# Altium schematic symbol library Components.SchLib: 76 symbols
Pins are listed as number, name and electrical type; pins without a type are passive.

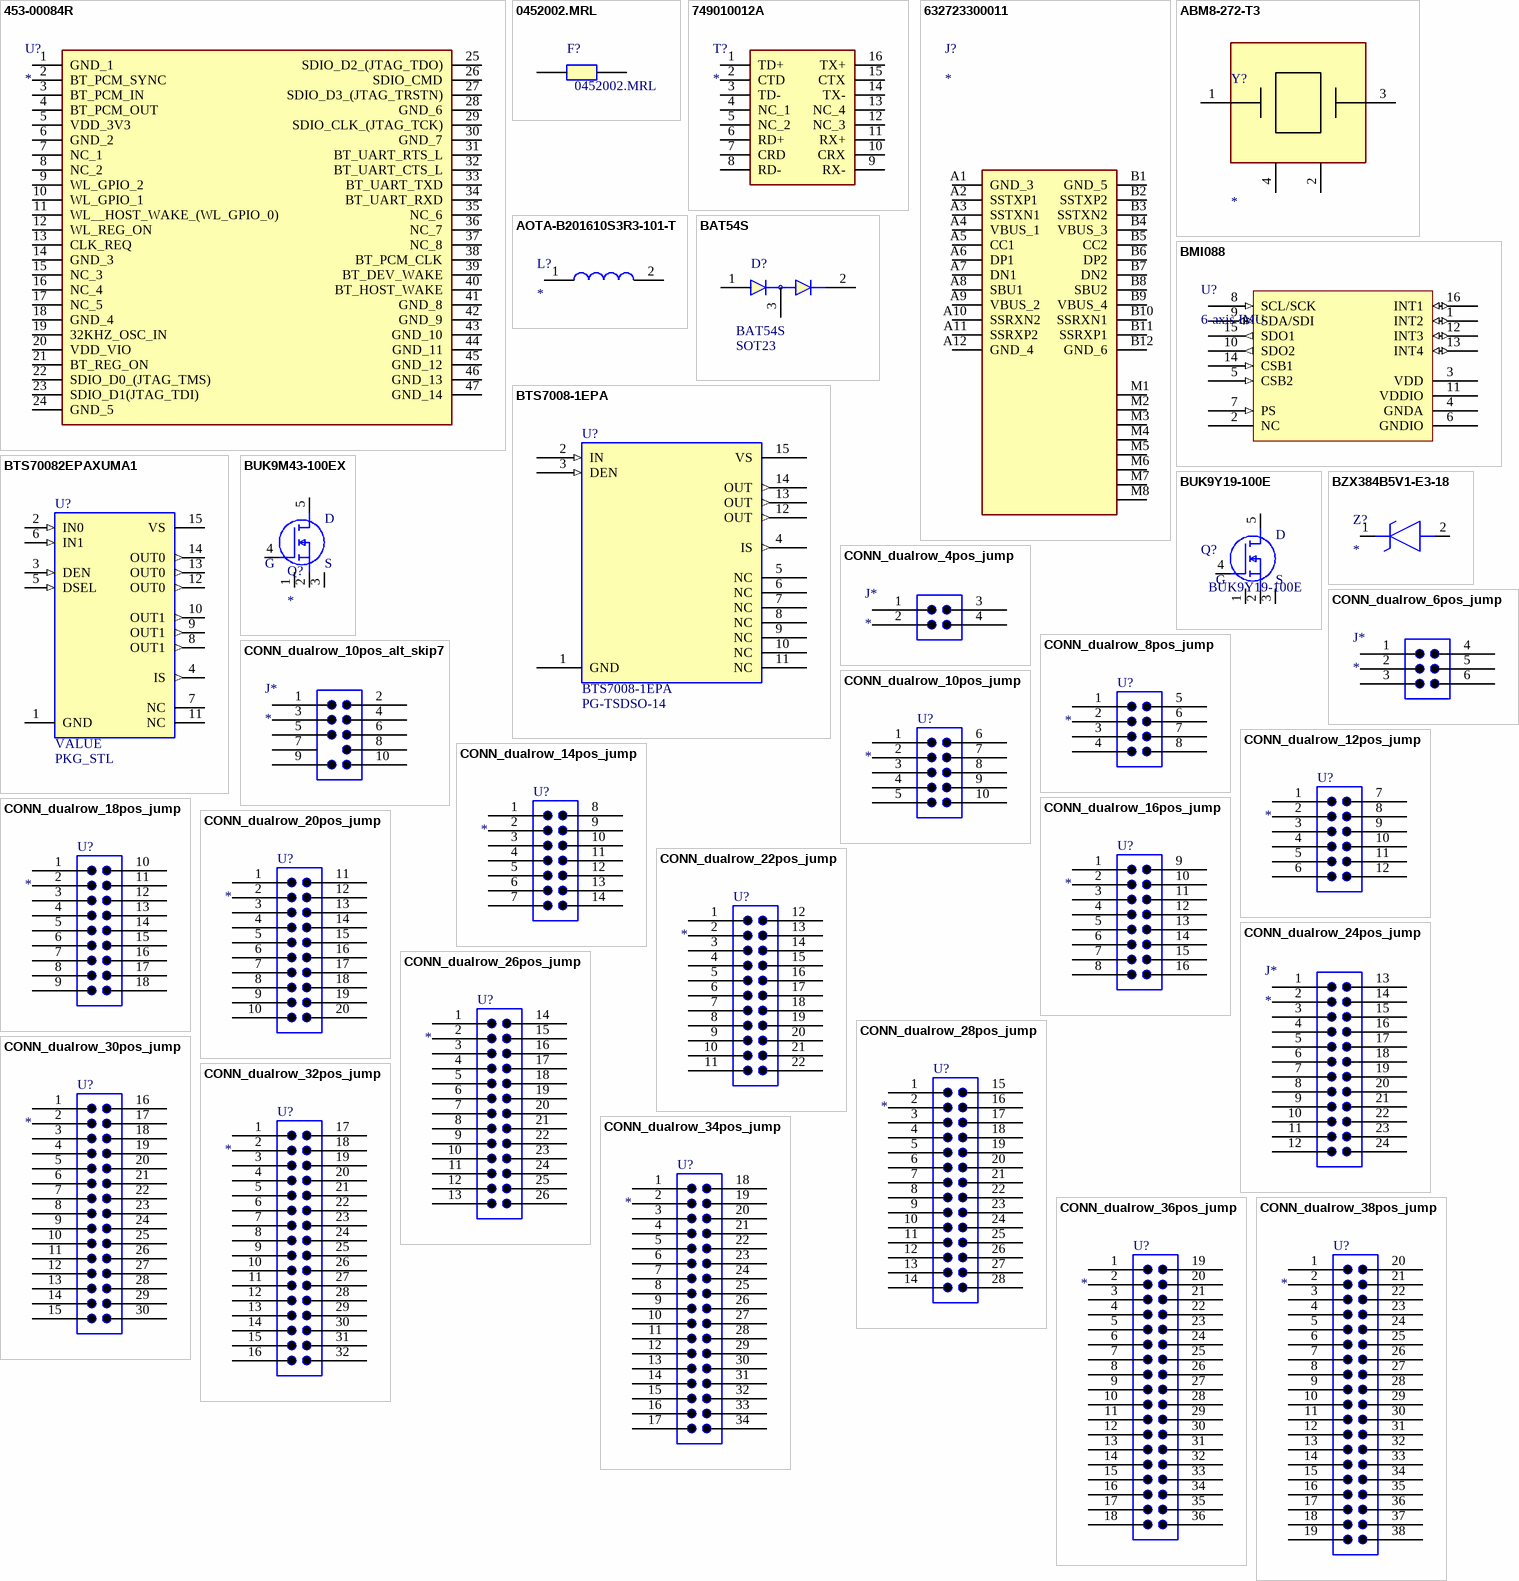
[diagram p0: symbols 453-00084R to CONN_dualrow_38pos_jump]

## 453-00084R
designator U?
Integrated Circuit; Manufacturer_Name: EZURIO; Manufacturer_Part_Number: 453-00084R; Datasheet Link: https://www.ezurio.com/documentation/datasheet-sterling-lwb-0; Height: 2.45mm; Category: Modules
footprint 45300084R
pins: 1 GND_1, 2 BT_PCM_SYNC, 3 BT_PCM_IN, 4 BT_PCM_OUT, 5 VDD_3V3, 6 GND_2, 7 NC_1, 8 NC_2, 9 WL_GPIO_2, 10 WL_GPIO_1, 11 WL__HOST_WAKE_(WL_GPIO_0), 12 WL_REG_ON, 13 CLK_REQ, 14 GND_3, 15 NC_3, 16 NC_4, 17 NC_5, 18 GND_4, 19 32KHZ_OSC_IN, 20 VDD_VIO, 21 BT_REG_ON, 22 SDIO_D0_(JTAG_TMS), 23 SDIO_D1(JTAG_TDI), 24 GND_5, 25 SDIO_D2_(JTAG_TDO), 26 SDIO_CMD, 27 SDIO_D3_(JTAG_TRSTN), 28 GND_6, 29 SDIO_CLK_(JTAG_TCK), 30 GND_7, 31 BT_UART_RTS_L, 32 BT_UART_CTS_L, 33 BT_UART_TXD, 34 BT_UART_RXD, 35 NC_6, 36 NC_7, 37 NC_8, 38 BT_PCM_CLK, 39 BT_DEV_WAKE, 40 BT_HOST_WAKE, 41 GND_8, 42 GND_9, 43 GND_10, 44 GND_11, 45 GND_12, 46 GND_13, 47 GND_14

## 0452002.MRL
designator F?
Littelfuse NANO2 452 fuse 2 A slow-blow 125 V 2410; Manufacturer: Littelfuse; Manufacturer Part Number: 0452002.MRL; Category: Passives
footprint LF_NANO2_2410
pins: 1, 2

## 749010012A
designator T?
Transformer; Manufacturer_Name: Wurth Elektronik; Manufacturer_Part_Number: 749010012A; Datasheet Link: https://www.we-online.com/catalog/datasheet/749010012A.pdf; Height: 5.4mm; Mouser Part Number: 710-749010012A; Mouser Price/Stock: https://www.mouser.co.uk/ProductDetail/Wurth-Elektronik/749010012A?qs=2sV1BwmkawS67xGrCyXf%2Fw%3D%3D; Category: Passives
footprint 749010012A
pins: 1 TD+, 2 CTD, 3 TD-, 4 NC_1, 5 NC_2, 6 RD+, 7 CRD, 8 RD-, 9 RX-, 10 CRX, 11 RX+, 12 NC_3, 13 NC_4, 14 TX-, 15 CTX, 16 TX+

## 632723300011
designator J?
Connector; Manufacturer_Name: Wurth Elektronik; Manufacturer_Part_Number: 632723300011; Datasheet Link: https://www.we-online.com/catalog/datasheet/632723300011.pdf; Height: 2mm; Mouser Part Number: 710-632723300011; Mouser Price/Stock: https://www.mouser.co.uk/ProductDetail/Wurth-Elektronik/632723300011?qs=NK6InXoXhq4%252B5eM1PePLPg%3D%3D; Category: Connectors
footprint 632723300011
pins: A1 GND_3, A2 SSTXP1, A3 SSTXN1, A4 VBUS_1, A5 CC1, A6 DP1, A7 DN1, A8 SBU1, A9 VBUS_2, A10 SSRXN2, A11 SSRXP2, A12 GND_4, B1 GND_5, B2 SSTXP2, B3 SSTXN2, B4 VBUS_3, B5 CC2, B6 DP2, B7 DN2, B8 SBU2, B9 VBUS_4, B10 SSRXN1, B11 SSRXP1, B12 GND_6, M1, M2, M3, M4, M5, M6, M7, M8

## ABM8-272-T3
designator Y?
Crystal; Manufacturer_Name: ABRACON; Manufacturer_Part_Number: ABM8-272-T3; Datasheet Link: https://abracon.com/datasheets/ABM8-272-T3.pdf; Height: 0.8mm; Mouser Part Number: 815-ABM8-272-T3; Mouser Price/Stock: https://www.mouser.co.uk/ProductDetail/ABRACON/ABM8-272-T3?qs=QpmGXVUTftEj6miOiJBMxQ%3D%3D; Category: Passives
footprint ABM8272T3
pins: 1, 2, 3, 4

## AOTA-B201610S3R3-101-T
designator L?
Inductor; Manufacturer_Name: ABRACON; Manufacturer_Part_Number: AOTA-B201610S3R3-101-T; Datasheet Link: https://abracon.com/datasheets/AOTA-B201610S3R3-101-T.pdf; Height: 1mm; Mouser Part Number: 815-AB201610S3R3101T; Mouser Price/Stock: https://www.mouser.co.uk/ProductDetail/ABRACON/AOTA-B201610S3R3-101-T?qs=%252BXxaIXUDbq0IZvJW%2F2mv4w%3D%3D; Arrow Part Number: AOTA-B201610S3R3-101-T; Arrow Price/Stock: https://www.arrow.com/en/products/aota-b201610s3r3-101-t/abracon?utm_currency=USD&region=nac; Category: Passives
footprint AOTAB201610S3R3101T
pins: 1, 2

## BAT54S
designator D?  PKG_STYLE: SOT23  (hidden comment: BAT54S)
Dual Schottky barrier diode series 30 V 200 mA SOT23 (1 = A1 2 = K2 3 = K1/A2); PLACE: YES; VALUE: BAT54S; Category: Discretes
footprint SOT23_BAT54S
pins: 1 A1, 2 K2, 3 K1A2

## BMI088
designator U?, comment 6-axis IMU
6-axis motion tracking, high-performance; Category: Sensors
footprint BMI088
pins: 1 INT2 (io), 2 NC, 3 VDD (power), 4 GNDA (power), 5 CSB2 (in), 6 GNDIO (power), 7 PS (in), 8 SCL/SCK (in), 9 SDA/SDI (io), 10 SDO2 (out), 11 VDDIO (power), 12 INT3 (io), 13 INT4 (io), 14 CSB1 (in), 15 SDO1 (out), 16 INT1 (io)

## BTS7008-1EPA
designator U?  PKG_STYLE: PG-TSDSO-14  (hidden comment: BTS7008-1EPA)
Infineon PROFET+2 12V smart high-side switch 1 ch 8 mOhm PG-TSDSO-14 with exposed pad (EP = VS); PLACE: YES; VALUE: BTS7008-1EPA; Category: Power
footprint PG-TSDSO-14_BTS7008
pins: 1 GND (power), 2 IN (in), 3 DEN (in), 4 IS (out), 5 NC, 6 NC, 7 NC, 8 NC, 9 NC, 10 NC, 11 NC, 12 OUT (out), 13 OUT (out), 14 OUT (out), 15 VS (power)

## BTS70082EPAXUMA1
designator U?  PKG_STYLE: PKG_STL  (hidden comment: BTS70082EPAXUMA1)
Infineon BTS7008-2EPA PROFET+2 12V dual 8 mohm smart high-side switch, PG-TSDSO-14, EP = 15 (VS); PLACE: YES; Manufacturer: Infineon; Manufacturer Part Number: BTS70082EPAXUMA1; VALUE: VALUE; Category: Power
footprint IFX_PG-TSDSO-14
pins: 1 GND (power), 2 IN0 (in), 3 DEN (in), 4 IS (out), 5 DSEL (in), 6 IN1 (in), 7 NC, 8 OUT1 (out), 9 OUT1 (out), 10 OUT1 (out), 11 NC, 12 OUT0 (out), 13 OUT0 (out), 14 OUT0 (out), 15 VS (power)

## BUK9M43-100EX
designator Q?
MOSFET (N-Channel); Manufacturer_Name: Nexperia; Manufacturer_Part_Number: BUK9M43-100EX; Datasheet Link: https://assets.nexperia.com/documents/data-sheet/BUK9M43-100E.pdf; Height: 1mm; Mouser Part Number: 771-BUK9M43-100EX; Mouser Price/Stock: https://www.mouser.co.uk/ProductDetail/Nexperia/BUK9M43-100EX?qs=VNgDqqxT8YV9a5FWS9qs3Q%3D%3D; Arrow Part Number: BUK9M43-100EX; Arrow Price/Stock: https://www.arrow.com/en/products/buk9m43-100ex/nexperia; Category: Discretes
footprint BUK9M156100EX
pins: 1 S, 2 S, 3 S, 4 G, 5 D

## BUK9Y19-100E
designator Q?
Nexperia BUK9Y19-100E N-ch 100 V 19 mohm LFPAK56 (AEC-Q101); Manufacturer: Nexperia; Manufacturer Part Number: BUK9Y19-100E; Category: Discretes
footprint LFPAK56_SOT669
pins: 1 S, 2 S, 3 S, 4 G, 5 D

## BZX384B5V1-E3-18
designator Z?
Zener Diode; Manufacturer_Name: Vishay; Manufacturer_Part_Number: BZX384B5V1-E3-18; Datasheet Link: https://www.vishay.com/docs/85764/bzx384.pdf; Height: 1.15mm; Mouser Part Number: 78-BZX384B5V1-E3-18; Mouser Price/Stock: https://www.mouser.co.uk/ProductDetail/Vishay-Semiconductors/BZX384B5V1-E3-18?qs=KP8Io%2FXyE5RB469oWB6DPA%3D%3D; Arrow Part Number: BZX384B5V1-E3-18; Arrow Price/Stock: https://www.arrow.com/en/products/bzx384b5v1-e3-18/vishay?region=nac; Category: Discretes
footprint SOD2713X115N
pins: 1 K, 2 A

## CONN_dualrow_4pos_jump
designator J*
Category: Connectors
footprint SAMTEC_IPL1-102-01-X-D-K
pins: 1, 2, 3, 4

## CONN_dualrow_6pos_jump
designator J*
Category: Connectors
footprint SAMTEC_IPL1-103-01-X-D-K
pins: 1, 2, 3, 4, 5, 6

## CONN_dualrow_8pos_jump
designator U?
Dual row connector, 8 pins (4 per row), row-sequential numbering; Category: Connectors
footprint SAMTEC_IPL1-104-01-X-D-K
pins: 1, 2, 3, 4, 5, 6, 7, 8

## CONN_dualrow_10pos_alt_skip7
designator J*
Category: Connectors
footprint SAMTEC_FTSH-105-01-X-DV-P-K-X
pins: 1, 2, 3, 4, 5, 6, 7, 8, 9, 10

## CONN_dualrow_10pos_jump
designator U?
Dual row connector, 10 pins (5 per row), row-sequential numbering; Category: Connectors
footprint SAMTEC_IPL1-105-01-X-D-K
pins: 1, 2, 3, 4, 5, 6, 7, 8, 9, 10

## CONN_dualrow_12pos_jump
designator U?
Dual row connector, 12 pins (6 per row), row-sequential numbering; Category: Connectors
footprint SAMTEC_IPL1-106-01-X-D-K
pins: 1, 2, 3, 4, 5, 6, 7, 8, 9, 10, 11, 12

## CONN_dualrow_14pos_jump
designator U?
Dual row connector, 14 pins (7 per row), row-sequential numbering; Category: Connectors
footprint SAMTEC_IPL1-107-01-X-D-K
pins: 1, 2, 3, 4, 5, 6, 7, 8, 9, 10, 11, 12, 13, 14

## CONN_dualrow_16pos_jump
designator U?
Dual row connector, 16 pins (8 per row), row-sequential numbering; Category: Connectors
footprint SAMTEC_IPL1-108-01-X-D-K
pins: 1, 2, 3, 4, 5, 6, 7, 8, 9, 10, 11, 12, 13, 14, 15, 16

## CONN_dualrow_18pos_jump
designator U?
Dual row connector, 18 pins (9 per row), row-sequential numbering; Category: Connectors
footprint SAMTEC_IPL1-109-01-X-D-K
pins: 1, 2, 3, 4, 5, 6, 7, 8, 9, 10, 11, 12, 13, 14, 15, 16, 17, 18

## CONN_dualrow_20pos_jump
designator U?
Dual row connector, 20 pins (10 per row), row-sequential numbering; Category: Connectors
footprint SAMTEC_IPL1-110-01-X-D-K
pins: 1, 2, 3, 4, 5, 6, 7, 8, 9, 10, 11, 12, 13, 14, 15, 16, 17, 18, 19, 20

## CONN_dualrow_22pos_jump
designator U?
Dual row connector, 22 pins (11 per row), row-sequential numbering; Category: Connectors
footprint SAMTEC_IPL1-111-01-X-D-K
pins: 1, 2, 3, 4, 5, 6, 7, 8, 9, 10, 11, 12, 13, 14, 15, 16, 17, 18, 19, 20, 21, 22

## CONN_dualrow_24pos_jump
designator J*
Category: Connectors
footprint SAMTEC_IPL1-112-01-X-D-K
pins: 1, 2, 3, 4, 5, 6, 7, 8, 9, 10, 11, 12, 13, 14, 15, 16, 17, 18, 19, 20, 21, 22, 23, 24

## CONN_dualrow_26pos_jump
designator U?
Dual row connector, 26 pins (13 per row), row-sequential numbering; Category: Connectors
footprint SAMTEC_IPL1-113-01-X-D-K
pins: 1, 2, 3, 4, 5, 6, 7, 8, 9, 10, 11, 12, 13, 14, 15, 16, 17, 18, 19, 20, 21, 22, 23, 24, 25, 26

## CONN_dualrow_28pos_jump
designator U?
Dual row connector, 28 pins (14 per row), row-sequential numbering; Category: Connectors
footprint SAMTEC_IPL1-114-01-X-D-K
pins: 1, 2, 3, 4, 5, 6, 7, 8, 9, 10, 11, 12, 13, 14, 15, 16, 17, 18, 19, 20, 21, 22, 23, 24, 25, 26, 27, 28

## CONN_dualrow_30pos_jump
designator U?
Dual row connector, 30 pins (15 per row), row-sequential numbering; Category: Connectors
footprint SAMTEC_IPL1-115-01-X-D-K
pins: 1, 2, 3, 4, 5, 6, 7, 8, 9, 10, 11, 12, 13, 14, 15, 16, 17, 18, 19, 20, 21, 22, 23, 24, 25, 26, 27, 28, 29, 30

## CONN_dualrow_32pos_jump
designator U?
Dual row connector, 32 pins (16 per row), row-sequential numbering; Category: Connectors
footprint SAMTEC_IPL1-116-01-X-D-K
pins: 1, 2, 3, 4, 5, 6, 7, 8, 9, 10, 11, 12, 13, 14, 15, 16, 17, 18, 19, 20, 21, 22, 23, 24, 25, 26, 27, 28, 29, 30, 31, 32

## CONN_dualrow_34pos_jump
designator U?
Dual row connector, 34 pins (17 per row), row-sequential numbering; Category: Connectors
footprint SAMTEC_IPL1-117-01-X-D-K
pins: 1, 2, 3, 4, 5, 6, 7, 8, 9, 10, 11, 12, 13, 14, 15, 16, 17, 18, 19, 20, 21, 22, 23, 24, 25, 26, 27, 28, 29, 30, 31, 32, 33, 34

## CONN_dualrow_36pos_jump
designator U?
Dual row connector, 36 pins (18 per row), row-sequential numbering; Category: Connectors
footprint SAMTEC_IPL1-118-01-X-D-K
pins: 1, 2, 3, 4, 5, 6, 7, 8, 9, 10, 11, 12, 13, 14, 15, 16, 17, 18, 19, 20, 21, 22, 23, 24, 25, 26, 27, 28, 29, 30, 31, 32, 33, 34, 35, 36

## CONN_dualrow_38pos_jump
designator U?
Dual row connector, 38 pins (19 per row), row-sequential numbering; Category: Connectors
footprint SAMTEC_IPL1-119-01-X-D-K
pins: 1, 2, 3, 4, 5, 6, 7, 8, 9, 10, 11, 12, 13, 14, 15, 16, 17, 18, 19, 20, 21, 22, 23, 24, 25, 26, 27, 28, 29, 30, 31, 32, 33, 34, 35, 36, 37, 38

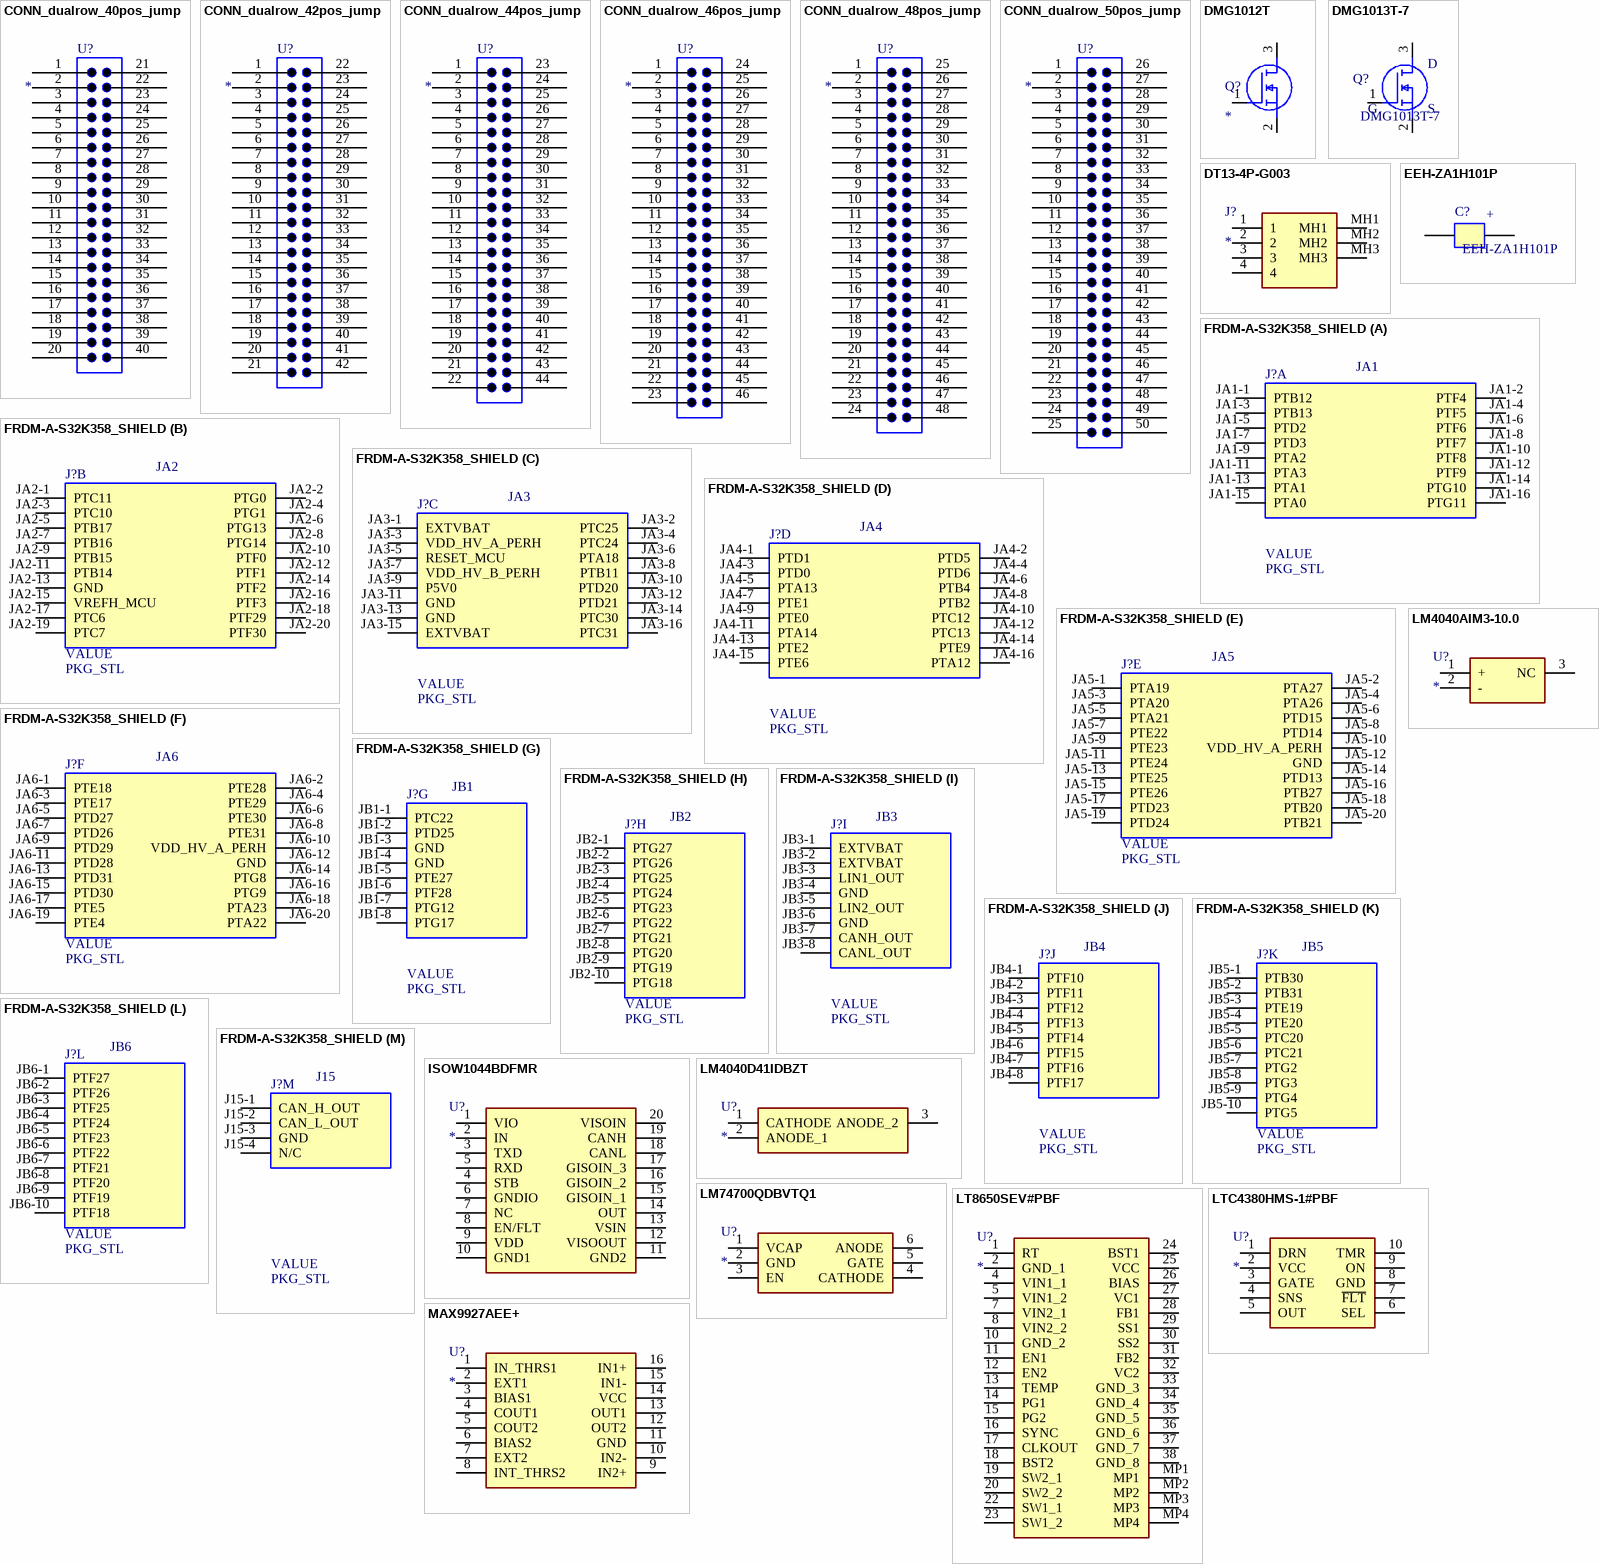
[diagram p1: symbols CONN_dualrow_40pos_jump to MAX9927AEE+]

## CONN_dualrow_40pos_jump
designator U?
Dual row connector, 40 pins (20 per row), row-sequential numbering; Category: Connectors
footprint SAMTEC_IPL1-120-01-X-D-K
pins: 1, 2, 3, 4, 5, 6, 7, 8, 9, 10, 11, 12, 13, 14, 15, 16, 17, 18, 19, 20, 21, 22, 23, 24, 25, 26, 27, 28, 29, 30, 31, 32, 33, 34, 35, 36, 37, 38, 39, 40

## CONN_dualrow_42pos_jump
designator U?
Dual row connector, 42 pins (21 per row), row-sequential numbering; Category: Connectors
footprint SAMTEC_IPL1-121-01-X-D-K
pins: 1, 2, 3, 4, 5, 6, 7, 8, 9, 10, 11, 12, 13, 14, 15, 16, 17, 18, 19, 20, 21, 22, 23, 24, 25, 26, 27, 28, 29, 30, 31, 32, 33, 34, 35, 36, 37, 38, 39, 40, 41, 42

## CONN_dualrow_44pos_jump
designator U?
Dual row connector, 44 pins (22 per row), row-sequential numbering; Category: Connectors
footprint SAMTEC_IPL1-122-01-X-D-K
pins: 1, 2, 3, 4, 5, 6, 7, 8, 9, 10, 11, 12, 13, 14, 15, 16, 17, 18, 19, 20, 21, 22, 23, 24, 25, 26, 27, 28, 29, 30, 31, 32, 33, 34, 35, 36, 37, 38, 39, 40, 41, 42, 43, 44

## CONN_dualrow_46pos_jump
designator U?
Dual row connector, 46 pins (23 per row), row-sequential numbering; Category: Connectors
footprint SAMTEC_IPL1-123-01-X-D-K
pins: 1, 2, 3, 4, 5, 6, 7, 8, 9, 10, 11, 12, 13, 14, 15, 16, 17, 18, 19, 20, 21, 22, 23, 24, 25, 26, 27, 28, 29, 30, 31, 32, 33, 34, 35, 36, 37, 38, 39, 40, 41, 42, 43, 44, 45, 46

## CONN_dualrow_48pos_jump
designator U?
Dual row connector, 48 pins (24 per row), row-sequential numbering; Category: Connectors
footprint SAMTEC_IPL1-124-01-X-D-K
pins: 1, 2, 3, 4, 5, 6, 7, 8, 9, 10, 11, 12, 13, 14, 15, 16, 17, 18, 19, 20, 21, 22, 23, 24, 25, 26, 27, 28, 29, 30, 31, 32, 33, 34, 35, 36, 37, 38, 39, 40, 41, 42, 43, 44, 45, 46, 47, 48

## CONN_dualrow_50pos_jump
designator U?
Dual row connector, 50 pins (25 per row), row-sequential numbering; Category: Connectors
footprint SAMTEC_IPL1-125-01-X-D-K
pins: 1, 2, 3, 4, 5, 6, 7, 8, 9, 10, 11, 12, 13, 14, 15, 16, 17, 18, 19, 20, 21, 22, 23, 24, 25, 26, 27, 28, 29, 30, 31, 32, 33, 34, 35, 36, 37, 38, 39, 40, 41, 42, 43, 44, 45, 46, 47, 48, 49, 50

## DMG1012T
designator Q?
MOSFET (N-Channel); Manufacturer_Name: Diodes Incorporated; Manufacturer_Part_Number: DMG1012T; Datasheet Link: https://www.diodes.com/datasheet/download/DMG1012T.pdf; Height: 0.9mm; Mouser Part Number: N/A; Mouser Price/Stock: https://www.mouser.co.uk/ProductDetail/Diodes-Incorporated/DMG1012T?qs=Wj%2FVkw3K%252BMD5naxckZUW%2FA%3D%3D; Category: Discretes
footprint SOT50P160X90-3N
pins: 1 G, 2 S, 3 D

## DMG1013T-7
designator Q?
Diodes DMG1013T P-ch 20 V SOT-523; Manufacturer: Diodes Incorporated; Manufacturer Part Number: DMG1013T-7; Category: Discretes
footprint SOT523_DIODES
pins: 1 G, 2 S, 3 D

## DT13-4P-G003
designator J?
Connector; Manufacturer_Name: TE Connectivity; Manufacturer_Part_Number: DT13-4P-G003; Datasheet Link: https://www.te.com/en/product-DT13-4P-G003.html; Height: 35.89mm; Mouser Part Number: 571-DT13-4P-G003; Mouser Price/Stock: https://www.mouser.co.uk/ProductDetail/TE-Connectivity-DEUTSCH/DT13-4P-G003?qs=cgQJD%2FpJz0yNM4XcY%252BZZxQ%3D%3D; Category: Connectors
footprint DT134PG003
pins: 1, 2, 3, 4, MH1, MH2, MH3

## EEH-ZA1H101P
designator C?
Panasonic ZA hybrid polymer 100 uF 50 V case G; pin 1 = +; Manufacturer: Panasonic; Manufacturer Part Number: EEH-ZA1H101P; Category: Passives
footprint PANA_SMD_CAP_G
pins: 1 +, 2 -

## FRDM-A-S32K358_SHIELD
designator J?, comment PKG_STYLE: PKG_STL  (hidden comment: FRDM-A-S32K358 JA/JB/J15)
Mating connector set for NXP FRDM-A-S32K358 Rev A: parts 1-6 = JA1-JA6, 7-12 = JB1-JB6 (DNP on FRDM), 13 = J15 CAN; pin names = default MCU signal per board BOM, pin descriptions = schematic functions/options; Manufacturer: NXP (mates FRDM-A-S32K358 Rev A); PLACE: YES; VALUE: VALUE; Category: Connectors
footprint FRDM-A-S32K358_JA_MATE
part A pins: JA1-1 PTB12 "GD_EN (DEVKIT-MOTORGD)", JA1-2 PTF4, JA1-3 PTB13 "GD_RST_B (DEVKIT-MOTORGD)", JA1-4 PTF5, JA1-5 PTD2 "PWMA_HS_B (DEVKIT-MOTORGD)", JA1-6 PTF6, JA1-7 PTD3 "PWMA_LS (DEVKIT-MOTORGD)", JA1-8 PTF7, JA1-9 PTA2 "PWMB_HS_B (DEVKIT-MOTORGD)", JA1-10 PTF8, JA1-11 PTA3 "PWMB_LS (DEVKIT-MOTORGD)", JA1-12 PTF9, JA1-13 PTA1 "PWMC_HS_B (DEVKIT-MOTORGD)", JA1-14 PTG10, JA1-15 PTA0 "PWMC_LS (DEVKIT-MOTORGD)", JA1-16 PTG11
part B pins: JA2-1 PTC11, JA2-2 PTG0, JA2-3 PTC10 "BRAKE_PWM", JA2-4 PTG1, JA2-5 PTB17 "LPSPI1_PCS0 / GPIO/SS (via R409)", JA2-6 PTG13, JA2-7 PTB16 "LPSPI1_SOUT / GPIO/MOSI (via R407)", JA2-8 PTG14, JA2-9 PTB15 "LPSPI1_SIN / GPIO/MISO (via R406)", JA2-10 PTF0, JA2-11 PTB14 "LPSPI1_SCK / GPIO/SCK (via R405)", JA2-12 PTF1, JA2-13 GND, JA2-14 PTF2, JA2-15 VREFH_MCU "VREFH (VREFH_MCU via R404, C151 0.22uF to GND)", JA2-16 PTF3, JA2-17 PTC6 "I2C_SDA / GD_OUT; PTC6 via R403; 10k pull-up R396 to VDD_HV_A_PERH; alt PTC29 (R399 DNP), PTE3 (R400 DNP)", JA2-18 PTF29, JA2-19 PTC7 "I2C_SCL / GD_INT; PTC7 via R401; 10k pull-up R397 to VDD_HV_A_PERH; alt PTC28 (R398 DNP)", JA2-20 PTF30
part C pins: JA3-1 EXTVBAT, JA3-2 PTC25, JA3-3 VDD_HV_A_PERH, JA3-4 PTC24, JA3-5 RESET_MCU "RESET_MCU via R419; alt PTE7 (R420 DNP)", JA3-6 PTA18 "PTA18 via R432; alt PTA9 (R430 DNP)", JA3-7 VDD_HV_B_PERH, JA3-8 PTB11, JA3-9 P5V0, JA3-10 PTD20, JA3-11 GND, JA3-12 PTD21, JA3-13 GND, JA3-14 PTC30, JA3-15 EXTVBAT, JA3-16 PTC31
part D pins: JA4-1 PTD1 "DCBI (DEVKIT-MOTORGD)", JA4-2 PTD5 "SAI0_DATA3 (VDD_HVB domain)", JA4-3 PTD0 "DCBV (DEVKIT-MOTORGD)", JA4-4 PTD6 "SAI0_DATA2 (VDD_HVB domain)", JA4-5 PTA13 "BEMF_A/PHB_I (DEVKIT-MOTORGD, as labelled)", JA4-6 PTB4 "SAI0_DATA1 (VDD_HVB domain)", JA4-7 PTE1 "BEMF_B/PHB_I (DEVKIT-MOTORGD); PTE1 via R417; alt PTA8 (R418 DNP)", JA4-8 PTB2 "SAI0_DATA0 (VDD_HVB domain)", JA4-9 PTE0 "BEMF_C/PHC_I (DEVKIT-MOTORGD); PTE0 via R412; alt PTA9 (R413 DNP), PTA18 (R414 DNP)", JA4-10 PTC12 "SAI0_BCLK (VDD_HVB domain)", JA4-11 PTA14, JA4-12 PTC13 "SAI0_SYNC (VDD_HVB domain)", JA4-13 PTE2, JA4-14 PTE9 "SAI0_MCLK (VDD_HVB domain)", JA4-15 PTE6, JA4-16 PTA12
part E pins: JA5-1 PTA19, JA5-2 PTA27, JA5-3 PTA20, JA5-4 PTA26 "PTA26 via R431; alt SAI1_BCLK = PTE8 (R435 DNP)", JA5-5 PTA21 "PTA21 via R415; alt PTE21 (R416 DNP)", JA5-6 PTD15 "SAI1_SYNC; PTD15 via R429", JA5-7 PTE22, JA5-8 PTD14 "PTD14 via R428; alt SAI0_BCLK = PTC12 (R433 DNP)", JA5-9 PTE23, JA5-10 VDD_HV_A_PERH, JA5-11 PTE24, JA5-12 GND, JA5-13 PTE25, JA5-14 PTD13 "PTD13 via R427", JA5-15 PTE26, JA5-16 PTB27 "PTB27 via R426; alt Arduino SDA = PTE14 (R421 DNP)", JA5-17 PTD23, JA5-18 PTB20 "PTB20 via R425; alt Arduino SCL = PTE3 (R422 DNP)", JA5-19 PTD24, JA5-20 PTB21 "PTB21 via R424"
part F pins: JA6-1 PTE18, JA6-2 PTE28, JA6-3 PTE17, JA6-4 PTE29, JA6-5 PTD27, JA6-6 PTE30, JA6-7 PTD26, JA6-8 PTE31, JA6-9 PTD29, JA6-10 VDD_HV_A_PERH, JA6-11 PTD28, JA6-12 GND, JA6-13 PTD31, JA6-14 PTG8, JA6-15 PTD30, JA6-16 PTG9, JA6-17 PTE5 "RXD2_FXIO", JA6-18 PTA23, JA6-19 PTE4 "TXD2_FXIO", JA6-20 PTA22
part G pins: JB1-1 PTC22 "JB headers are DNP on FRDM-A-S32K358 Rev A", JB1-2 PTD25 "JB headers are DNP on FRDM-A-S32K358 Rev A", JB1-3 GND "GND; JB headers are DNP on FRDM-A-S32K358 Rev A", JB1-4 GND "GND; JB headers are DNP on FRDM-A-S32K358 Rev A", JB1-5 PTE27 "JB headers are DNP on FRDM-A-S32K358 Rev A", JB1-6 PTF28 "JB headers are DNP on FRDM-A-S32K358 Rev A", JB1-7 PTG12 "JB headers are DNP on FRDM-A-S32K358 Rev A", JB1-8 PTG17 "JB headers are DNP on FRDM-A-S32K358 Rev A"
part H pins: JB2-1 PTG27 "JB headers are DNP on FRDM-A-S32K358 Rev A", JB2-2 PTG26 "JB headers are DNP on FRDM-A-S32K358 Rev A", JB2-3 PTG25 "JB headers are DNP on FRDM-A-S32K358 Rev A", JB2-4 PTG24 "JB headers are DNP on FRDM-A-S32K358 Rev A", JB2-5 PTG23 "JB headers are DNP on FRDM-A-S32K358 Rev A", JB2-6 PTG22 "JB headers are DNP on FRDM-A-S32K358 Rev A", JB2-7 PTG21 "JB headers are DNP on FRDM-A-S32K358 Rev A", JB2-8 PTG20 "JB headers are DNP on FRDM-A-S32K358 Rev A", JB2-9 PTG19 "JB headers are DNP on FRDM-A-S32K358 Rev A", JB2-10 PTG18 "JB headers are DNP on FRDM-A-S32K358 Rev A"
part I pins: JB3-1 EXTVBAT "EXTVBAT; JB headers are DNP on FRDM-A-S32K358 Rev A", JB3-2 EXTVBAT "EXTVBAT; JB headers are DNP on FRDM-A-S32K358 Rev A", JB3-3 LIN1_OUT "LIN1_OUT (VSUP level); JB headers are DNP on FRDM-A-S32K358 Rev A", JB3-4 GND "GND; JB headers are DNP on FRDM-A-S32K358 Rev A", JB3-5 LIN2_OUT "LIN2_OUT (VSUP level); JB headers are DNP on FRDM-A-S32K358 Rev A", JB3-6 GND "GND; JB headers are DNP on FRDM-A-S32K358 Rev A", JB3-7 CANH_OUT "CANH_OUT (VSUP level); JB headers are DNP on FRDM-A-S32K358 Rev A", JB3-8 CANL_OUT "CANL_OUT (VSUP level); JB headers are DNP on FRDM-A-S32K358 Rev A"
part J pins: JB4-1 PTF10 "JB headers are DNP on FRDM-A-S32K358 Rev A", JB4-2 PTF11 "JB headers are DNP on FRDM-A-S32K358 Rev A", JB4-3 PTF12 "JB headers are DNP on FRDM-A-S32K358 Rev A", JB4-4 PTF13 "JB headers are DNP on FRDM-A-S32K358 Rev A", JB4-5 PTF14 "JB headers are DNP on FRDM-A-S32K358 Rev A", JB4-6 PTF15 "JB headers are DNP on FRDM-A-S32K358 Rev A", JB4-7 PTF16 "JB headers are DNP on FRDM-A-S32K358 Rev A", JB4-8 PTF17 "JB headers are DNP on FRDM-A-S32K358 Rev A"
part K pins: JB5-1 PTB30 "PTB30 via R748; JB headers are DNP on FRDM-A-S32K358 Rev A", JB5-2 PTB31 "JB headers are DNP on FRDM-A-S32K358 Rev A", JB5-3 PTE19 "PTE19 via R749; JB headers are DNP on FRDM-A-S32K358 Rev A", JB5-4 PTE20 "JB headers are DNP on FRDM-A-S32K358 Rev A", JB5-5 PTC20 "PTC20 via R751 - DNP, not connected by default; JB headers are DNP on FRDM-A-S32K358 Rev A", JB5-6 PTC21 "PTC21 via R750 - DNP, not connected by default; JB headers are DNP on FRDM-A-S32K358 Rev A", JB5-7 PTG2 "JB headers are DNP on FRDM-A-S32K358 Rev A", JB5-8 PTG3 "JB headers are DNP on FRDM-A-S32K358 Rev A", JB5-9 PTG4 "JB headers are DNP on FRDM-A-S32K358 Rev A", JB5-10 PTG5 "JB headers are DNP on FRDM-A-S32K358 Rev A"
part L pins: JB6-1 PTF27 "JB headers are DNP on FRDM-A-S32K358 Rev A", JB6-2 PTF26 "JB headers are DNP on FRDM-A-S32K358 Rev A", JB6-3 PTF25 "JB headers are DNP on FRDM-A-S32K358 Rev A", JB6-4 PTF24 "JB headers are DNP on FRDM-A-S32K358 Rev A", JB6-5 PTF23 "JB headers are DNP on FRDM-A-S32K358 Rev A", JB6-6 PTF22 "JB headers are DNP on FRDM-A-S32K358 Rev A", JB6-7 PTF21 "JB headers are DNP on FRDM-A-S32K358 Rev A", JB6-8 PTF20 "JB headers are DNP on FRDM-A-S32K358 Rev A", JB6-9 PTF19 "JB headers are DNP on FRDM-A-S32K358 Rev A", JB6-10 PTF18 "JB headers are DNP on FRDM-A-S32K358 Rev A"
part M pins: J15-1 CAN_H_OUT "CAN_H_OUT (on-board CAN transceiver bus side)", J15-2 CAN_L_OUT "CAN_L_OUT (on-board CAN transceiver bus side)", J15-3 GND, J15-4 N/C
part A text: JA1
part B text: JA2
part C text: JA3
part D text: JA4
part E text: JA5
part F text: JA6
part G text: JB1
part H text: JB2
part I text: JB3
part J text: JB4
part K text: JB5
part L text: JB6
part M text: J15

## ISOW1044BDFMR
designator U?
Integrated Circuit; Manufacturer_Name: Texas Instruments; Manufacturer_Part_Number: ISOW1044BDFMR; Datasheet Link: https://www.ti.com/lit/ds/symlink/isow1044.pdf?ts=1645295421849&ref_url=https%253A%252F%252Fwww.google.com%252F; Height: 3.55mm; Mouser Part Number: 595-ISOW1044BDFMR; Mouser Price/Stock: https://www.mouser.co.uk/ProductDetail/Texas-Instruments/ISOW1044BDFMR?qs=Li%252BoUPsLEnsRP1xV2fQwnw%3D%3D; Arrow Part Number: ISOW1044BDFMR; Arrow Price/Stock: https://www.arrow.com/en/products/isow1044bdfmr/texas-instruments?utm_currency=USD&region=nac; Category: Interface
footprint SOIC127P1030X355-20N
pins: 1 VIO, 2 IN, 3 TXD, 4 STB, 5 RXD, 6 GNDIO, 7 NC, 8 EN/FLT, 9 VDD, 10 GND1, 11 GND2, 12 VISOOUT, 13 VSIN, 14 OUT, 15 GISOIN_1, 16 GISOIN_2, 17 GISOIN_3, 18 CANL, 19 CANH, 20 VISOIN

## LM4040AIM3-10.0
designator U?
Integrated Circuit; Manufacturer_Name: Texas Instruments; Manufacturer_Part_Number: LM4040AIM3-10.0; Datasheet Link: http://www.ti.com/lit/ds/symlink/lm4040-n.pdf; Height: 1.12mm; Mouser Part Number: 926-LM4040AIM3-100; Mouser Price/Stock: https://www.mouser.com/Search/Refine.aspx?Keyword=926-LM4040AIM3-100; Arrow Part Number: LM4040AIM3-10.0; Arrow Price/Stock: https://www.arrow.com/en/products/lm4040aim3-10.0/texas-instruments; Category: Power
footprint SOT95P237X112-3N
pins: 1 +, 2 -, 3 NC

## LM4040D41IDBZT
designator U?
Integrated Circuit; Manufacturer_Name: Texas Instruments; Manufacturer_Part_Number: LM4040D41IDBZT; Datasheet Link: http://www.ti.com/lit/gpn/LM4040; Height: 1.12mm; Mouser Part Number: 595-LM4040D41IDBZT; Mouser Price/Stock: https://www.mouser.co.uk/ProductDetail/Texas-Instruments/LM4040D41IDBZT?qs=paYhMW8qfisvsnd9E%2FZD4Q%3D%3D; Category: Power
footprint SOT95P237X112-3N
pins: 1 CATHODE, 2 ANODE_1, 3 ANODE_2

## LM74700QDBVTQ1
designator U?
Integrated Circuit; Manufacturer_Name: Texas Instruments; Manufacturer_Part_Number: LM74700QDBVTQ1; Datasheet Link: http://www.ti.com/lit/ds/symlink/lm74700-q1.pdf; Height: 1.45mm; Mouser Part Number: 595-LM74700QDBVTQ1; Mouser Price/Stock: https://www.mouser.co.uk/ProductDetail/Texas-Instruments/LM74700QDBVTQ1?qs=j%252B1pi9TdxUYH9gWxbZdnXw%3D%3D; Arrow Part Number: LM74700QDBVTQ1; Arrow Price/Stock: https://www.arrow.com/en/products/lm74700qdbvtq1/texas-instruments.html?utm_currency=USD&region=nac; Category: Power
footprint SOT95P280X145-6N
pins: 1 VCAP, 2 GND, 3 EN, 4 CATHODE, 5 GATE, 6 ANODE

## LT8650SEV#PBF
designator U?
Integrated Circuit; Manufacturer_Name: Analog Devices; Manufacturer_Part_Number: LT8650SEV#PBF; Datasheet Link: https://www.analog.com/media/en/technical-documentation/data-sheets/lt8650s.pdf; Height: 1.03mm; Mouser Part Number: 584-LT8650SEVPBF; Mouser Price/Stock: https://www.mouser.co.uk/ProductDetail/Analog-Devices/LT8650SEVPBF?qs=xhbEVWpZdWes0pEs%2F8VaAQ%3D%3D; Arrow Part Number: LT8650SEV#PBF; Arrow Price/Stock: https://www.arrow.com/en/products/lt8650sevpbf/analog-devices?utm_currency=USD&region=europe; Category: Power
footprint LT8650SEVPBF
pins: 1 RT, 2 GND_1, 4 VIN1_1, 5 VIN1_2, 7 VIN2_1, 8 VIN2_2, 10 GND_2, 11 EN1, 12 EN2, 13 TEMP, 14 PG1, 15 PG2, 16 SYNC, 17 CLKOUT, 18 BST2, 19 SW2_1, 20 SW2_2, 22 SW1_1, 23 SW1_2, 24 BST1, 25 VCC, 26 BIAS, 27 VC1, 28 FB1, 29 SS1, 30 SS2, 31 FB2, 32 VC2, 33 GND_3, 34 GND_4, 35 GND_5, 36 GND_6, 37 GND_7, 38 GND_8, MP1, MP2, MP3, MP4

## LTC4380HMS-1#PBF
designator U?
Integrated Circuit; Manufacturer_Name: Analog Devices; Manufacturer_Part_Number: LTC4380HMS-1#PBF; Datasheet Link: https://www.analog.com/media/en/technical-documentation/data-sheets/ltc4380.pdf; Height: 1.1mm; Arrow Part Number: LTC4380HMS-1#PBF; Arrow Price/Stock: https://www.arrow.com/en/products/ltc4380hms-1pbf/analog-devices.html?utm_currency=USD&region=nac; Category: Power
footprint SOP50P490X110-10N
pins: 1 DRN, 2 VCC, 3 GATE, 4 SNS, 5 OUT, 6 SEL, 7 ~{FLT}, 8 GND, 9 ON, 10 TMR

## MAX9927AEE+
designator U?
Integrated Circuit; Manufacturer_Name: Analog Devices; Manufacturer_Part_Number: MAX9927AEE+; Datasheet Link: http://componentsearchengine.com/Datasheets/1/MAX9927AEE+.pdf; Height: 1.75mm; Mouser Part Number: 700-MAX9927AEE; Mouser Price/Stock: https://www.mouser.co.uk/ProductDetail/Analog-Devices-Maxim-Integrated/MAX9927AEE%2b?qs=CDqwynd4ZNrcUZ4eS7oVDQ%3D%3D; Category: Interface
footprint SOP64P602X175-16N
pins: 1 IN_THRS1, 2 EXT1, 3 BIAS1, 4 COUT1, 5 COUT2, 6 BIAS2, 7 EXT2, 8 INT_THRS2, 9 IN2+, 10 IN2-, 11 GND, 12 OUT2, 13 OUT1, 14 VCC, 15 IN1-, 16 IN1+

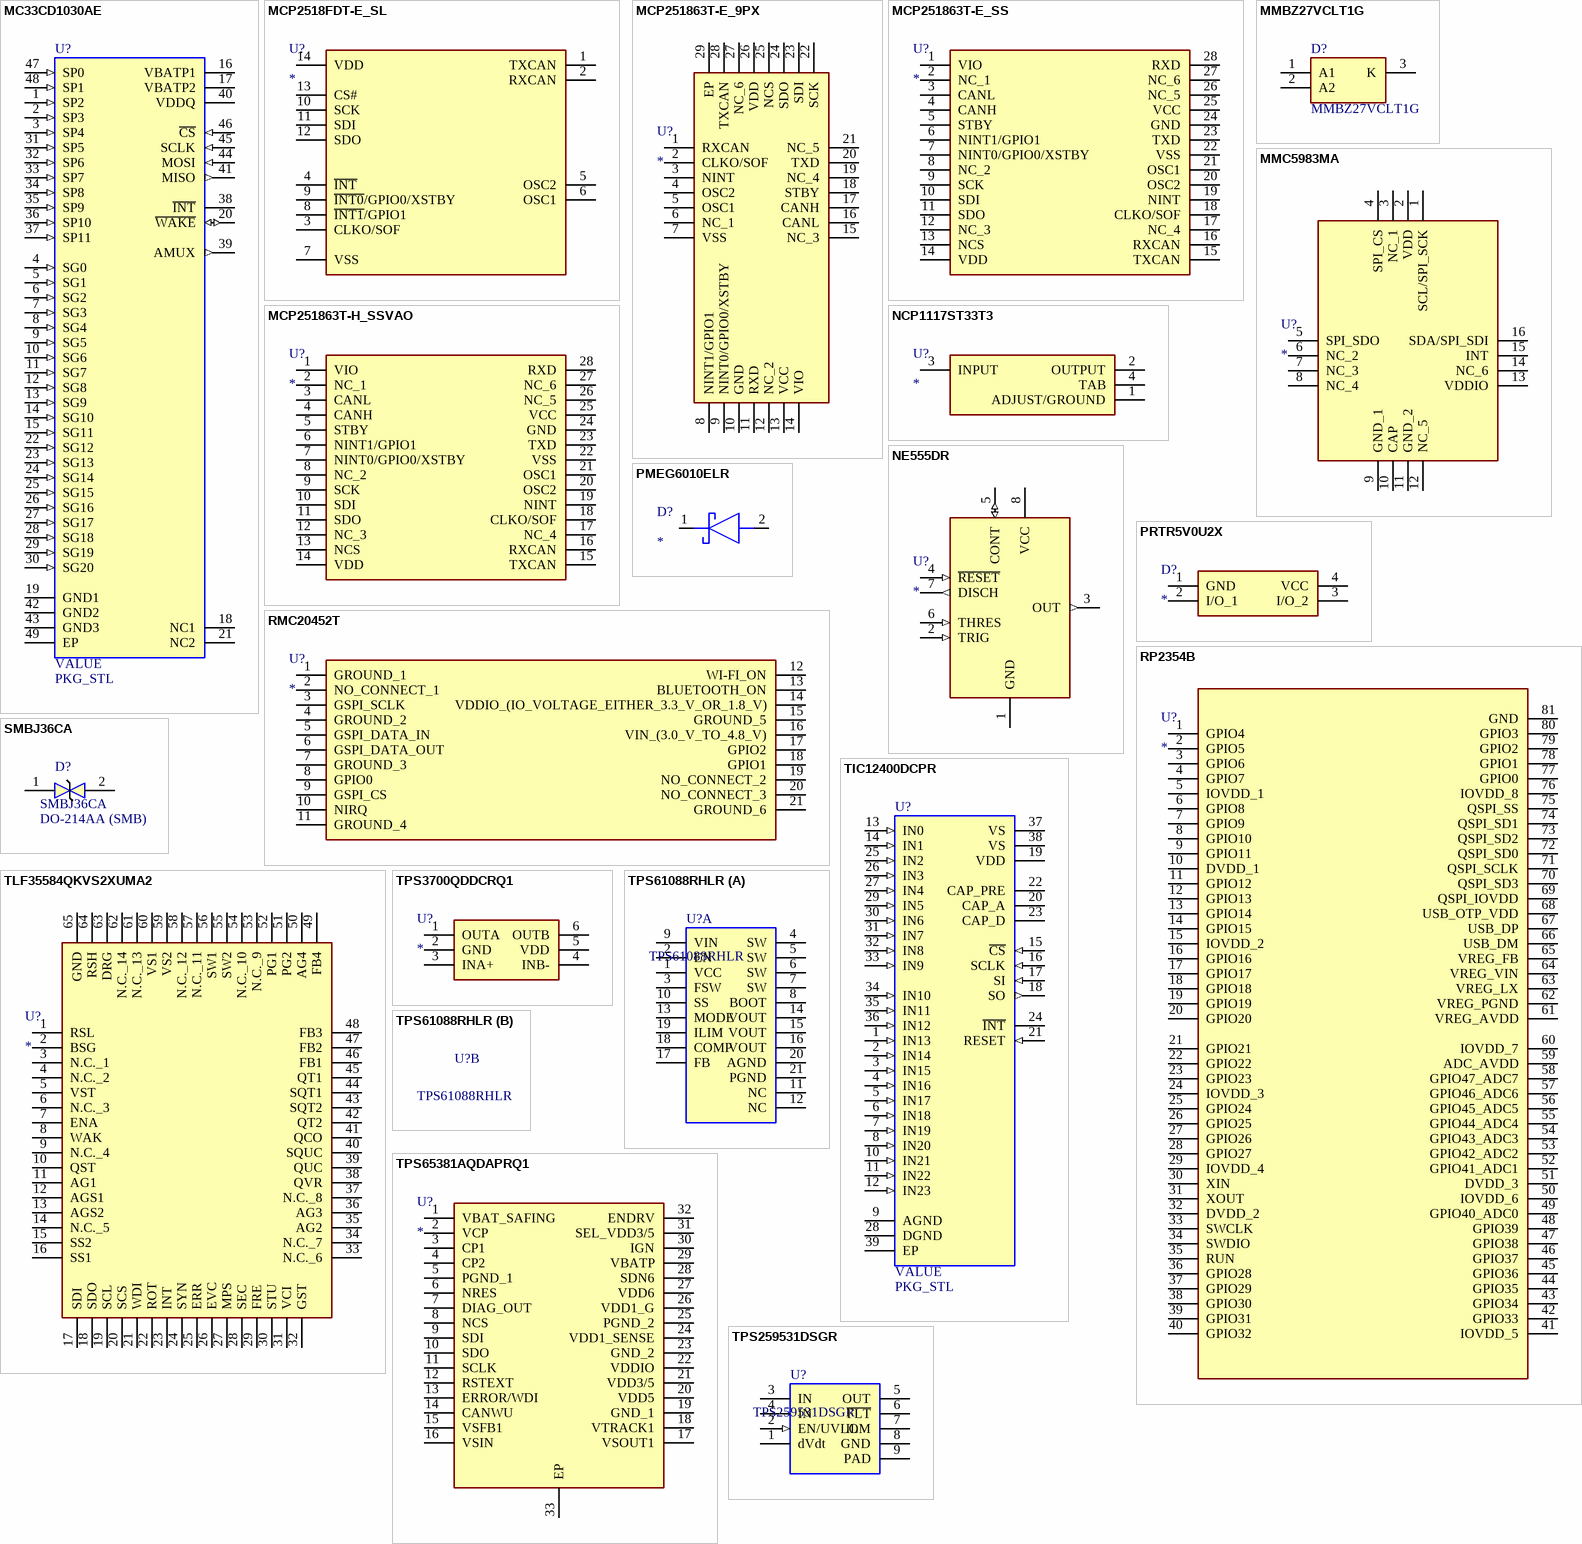
[diagram p2: symbols MC33CD1030AE to TPS259531DSGR]

## MC33CD1030AE
designator U?  PKG_STYLE: PKG_STL  (hidden comment: MC33CD1030AE)
NXP CD1030 33-ch multiple switch detection interface, SPI, 48-LQFP-EP 7x7 (98ASA00173D), EP = 49 (GND); PLACE: YES; Manufacturer: NXP; Manufacturer Part Number: MC33CD1030AE; VALUE: VALUE; Category: Interface
footprint NXP_98ASA00173D
pins: 1 SP2 (in), 2 SP3 (in), 3 SP4 (in), 4 SG0 (in), 5 SG1 (in), 6 SG2 (in), 7 SG3 (in), 8 SG4 (in), 9 SG5 (in), 10 SG6 (in), 11 SG7 (in), 12 SG8 (in), 13 SG9 (in), 14 SG10 (in), 15 SG11 (in), 16 VBATP1 (power), 17 VBATP2 (power), 18 NC1, 19 GND1 (power), 20 ~{WAKE} (io), 21 NC2, 22 SG12 (in), 23 SG13 (in), 24 SG14 (in), 25 SG15 (in), 26 SG16 (in), 27 SG17 (in), 28 SG18 (in), 29 SG19 (in), 30 SG20 (in), 31 SP5 (in), 32 SP6 (in), 33 SP7 (in), 34 SP8 (in), 35 SP9 (in), 36 SP10 (in), 37 SP11 (in), 38 ~{INT} (oc), 39 AMUX (out), 40 VDDQ (power), 41 MISO (out), 42 GND2 (power), 43 GND3 (power), 44 MOSI (in), 45 SCLK (in), 46 ~{CS} (in), 47 SP0 (in), 48 SP1 (in), 49 EP (power)

## MCP2518FDT-E_SL
designator U?
Integrated Circuit; Manufacturer_Name: Microchip; Manufacturer_Part_Number: MCP2518FDT-E/SL; Datasheet Link: https://datasheet.datasheetarchive.com/originals/distributors/Datasheets_SAMA/744760637e861ab0ee43f380fa65a694.pdf; Height: 1.75mm; Mouser Part Number: 579-MCP2518FDT-E/SL; Mouser Price/Stock: https://www.mouser.co.uk/ProductDetail/Microchip-Technology/MCP2518FDT-E-SL?qs=T3oQrply3y%2F7g%252BYAgK9Bdg%3D%3D; Arrow Part Number: MCP2518FDT-E/SL; Arrow Price/Stock: https://www.arrow.com/en/products/mcp2518fdt-esl/microchip-technology?utm_currency=USD&region=nac; Category: Interface
footprint SOIC127P600X175-14N
pins: 1 TXCAN, 2 RXCAN, 3 CLKO/SOF, 4 ~{INT}, 5 OSC2, 6 OSC1, 7 VSS, 8 ~{INT1}/GPIO1, 9 ~{INT0}/GPIO0/XSTBY, 10 SCK, 11 SDI, 12 SDO, 13 CS#, 14 VDD

## MCP251863T-E_9PX
designator U?
Integrated Circuit; Manufacturer_Name: Microchip; Manufacturer_Part_Number: MCP251863T-E/9PX; Datasheet Link: https://www.mouser.in/datasheet/2/268/MCP251863_External_CAN_FD_Controller_with_Integrat-3442054.pdf; Height: 0.9mm; Mouser Part Number: 579-MCP251863T-E/9PX; Mouser Price/Stock: https://www.mouser.co.uk/ProductDetail/Microchip-Technology/MCP251863T-E-9PX?qs=doiCPypUmgFIgTjTcpC6tw%3D%3D; Arrow Part Number: MCP251863T-E/9PX; Arrow Price/Stock: https://www.arrow.com/en/products/mcp251863t-e-9px/microchip-technology.html?utm_currency=USD&region=nac; Category: Interface
footprint QFN50P500X500X90-29N-D
pins: 1 RXCAN, 2 CLKO/SOF, 3 NINT, 4 OSC2, 5 OSC1, 6 NC_1, 7 VSS, 8 NINT1/GPIO1, 9 NINT0/GPIO0/XSTBY, 10 GND, 11 RXD, 12 NC_2, 13 VCC, 14 VIO, 15 NC_3, 16 CANL, 17 CANH, 18 STBY, 19 NC_4, 20 TXD, 21 NC_5, 22 SCK, 23 SDI, 24 SDO, 25 NCS, 26 VDD, 27 NC_6, 28 TXCAN, 29 EP

## MCP251863T-E_SS
designator U?
Integrated Circuit; Manufacturer_Name: Microchip; Manufacturer_Part_Number: MCP251863T-E/SS; Datasheet Link: https://no.mouser.com/datasheet/2/268/MCP251863_Data_Sheet_DS20006624A-2942420.pdf; Height: 2mm; Mouser Part Number: 579-MCP251863T-E/SS; Mouser Price/Stock: https://www.mouser.co.uk/ProductDetail/Microchip-Technology/MCP251863T-E-SS?qs=doiCPypUmgEjABEwFke1cA%3D%3D; Arrow Part Number: MCP251863T-E/SS; Arrow Price/Stock: https://www.arrow.com/en/products/mcp251863t-e-ss/microchip-technology.html?utm_currency=USD&region=nac; Category: Interface
footprint SOP65P780X200-28N
pins: 1 VIO, 2 NC_1, 3 CANL, 4 CANH, 5 STBY, 6 NINT1/GPIO1, 7 NINT0/GPIO0/XSTBY, 8 NC_2, 9 SCK, 10 SDI, 11 SDO, 12 NC_3, 13 NCS, 14 VDD, 15 TXCAN, 16 RXCAN, 17 NC_4, 18 CLKO/SOF, 19 NINT, 20 OSC2, 21 OSC1, 22 VSS, 23 TXD, 24 GND, 25 VCC, 26 NC_5, 27 NC_6, 28 RXD

## MCP251863T-H_SSVAO
designator U?
Integrated Circuit; Manufacturer_Name: Microchip; Manufacturer_Part_Number: MCP251863T-H/SSVAO; Datasheet Link: https://hr.mouser.com/ProductDetail/Microchip-Technology/MCP251863T-H-SSVAO?qs=t7xnP681wgVOKMfyix1vHQ%3D%3D; Height: 2mm; Category: Interface
footprint SOP65P780X200-28N
pins: 1 VIO, 2 NC_1, 3 CANL, 4 CANH, 5 STBY, 6 NINT1/GPIO1, 7 NINT0/GPIO0/XSTBY, 8 NC_2, 9 SCK, 10 SDI, 11 SDO, 12 NC_3, 13 NCS, 14 VDD, 15 TXCAN, 16 RXCAN, 17 NC_4, 18 CLKO/SOF, 19 NINT, 20 OSC2, 21 OSC1, 22 VSS, 23 TXD, 24 GND, 25 VCC, 26 NC_5, 27 NC_6, 28 RXD

## MMBZ27VCLT1G
designator D?
Diode; Manufacturer_Name: onsemi; Datasheet Link: https://www.onsemi.com/pub/Collateral/MMBZ15VDLT1-D.PDF; Height: 1.11mm; Manufacturer_Part_Number: MMBZ27VCLT1G; Mouser Part Number: 863-MMBZ27VCLT1G; Mouser Price/Stock: https://www.mouser.co.uk/ProductDetail/onsemi/MMBZ27VCLT1G?qs=P4IOph%252Bbot%2FeVOf3LAMmTg%3D%3D; Arrow Part Number: MMBZ27VCLT1G; Arrow Price/Stock: https://www.arrow.com/en/products/mmbz27vclt1g/on-semiconductor.html?utm_currency=USD&region=nac; Category: Discretes
footprint SOT95P237X112-3N
pins: 1 A1, 2 A2, 3 K

## MMC5983MA
designator U?
Integrated Circuit; Manufacturer_Name: MEMSIC; Manufacturer_Part_Number: MMC5983MA; Datasheet Link: https://www.mouser.com/datasheet/2/821/Memsic_09102019_MMC5983MA_Datasheet_Rev_A-1635338.pdf; Height: 1mm; Mouser Part Number: 438-MMC5983MA; Mouser Price/Stock: https://www.mouser.co.uk/ProductDetail/MEMSIC/MMC5983MA?qs=B6kkDfuK7%2FD5qasHMdEt2g%3D%3D; Arrow Part Number: MMC5983MA; Arrow Price/Stock: https://www.arrow.com/en/products/mmc5983ma/memsic?utm_currency=USD&region=nac; Category: Sensors
footprint MMC5983MA
pins: 1 SCL/SPI_SCK, 2 VDD, 3 NC_1, 4 SPI_CS, 5 SPI_SDO, 6 NC_2, 7 NC_3, 8 NC_4, 9 GND_1, 10 CAP, 11 GND_2, 12 NC_5, 13 VDDIO, 14 NC_6, 15 INT, 16 SDA/SPI_SDI

## NCP1117ST33T3
designator U?
Integrated Circuit; Manufacturer_Name: onsemi; Manufacturer_Part_Number: NCP1117ST33T3; Datasheet Link: http://www.onsemi.com/pub/Collateral/NCP1117-D.PDF; Height: 1.8mm; Mouser Part Number: 863-NCP1117ST33T3; Mouser Price/Stock: https://www.mouser.co.uk/ProductDetail/onsemi/NCP1117ST33T3?qs=Gev%252BmEvV0iYhENuVDWlecA%3D%3D; Category: Power
footprint SOT230P700X180-4N
pins: 1 ADJUST/GROUND, 2 OUTPUT, 3 INPUT, 4 TAB

## NE555DR
designator U?
Integrated Circuit; Manufacturer_Name: Texas Instruments; Manufacturer_Part_Number: NE555DR; Datasheet Link: http://www.ti.com/lit/ds/symlink/ne555.pdf; Height: 1.75mm; Mouser Part Number: 595-NE555DR; Mouser Price/Stock: https://www.mouser.com/Search/Refine.aspx?Keyword=595-NE555DR; RS Part Number: 1218414; RS Price/Stock: http://uk.rs-online.com/web/p/products/1218414; Category: Analog_Logic
footprint SOIC127P600X175-8N
pins: 1 GND (power), 2 TRIG (in), 3 OUT (out), 4 ~{RESET} (in), 5 CONT (io), 6 THRES (in), 7 DISCH (out), 8 VCC (power)

## PMEG6010ELR
designator D?
Schottky Diode; Manufacturer_Name: Nexperia; Manufacturer_Part_Number: PMEG6010ELR; Height: 1.1mm; Mouser Part Number: N/A; Mouser Price/Stock: https://www.mouser.com/Search/Refine.aspx?Keyword=N%2FA; Category: Discretes
footprint SOD3517X110N
pins: 1 K, 2 A

## PRTR5V0U2X
designator D?
Diode; Manufacturer_Name: Nexperia; Manufacturer_Part_Number: PRTR5V0U2X; Datasheet Link: https://assets.nexperia.com/documents/data-sheet/PRTR5V0U2X.pdf; Height: 1.1mm; Mouser Part Number: N/A; Mouser Price/Stock: https://www.mouser.co.uk/ProductDetail/Nexperia/PRTR5V0U2X?qs=vHuUswq2%252BsxqVTVM0kNyWw%3D%3D; Category: Discretes
footprint PRTR5V0U2X
pins: 1 GND, 2 I/O_1, 3 I/O_2, 4 VCC

## RMC20452T
designator U?
Integrated Circuit; Manufacturer_Name: RASPBERRY-PI; Manufacturer_Part_Number: RMC20452T; Datasheet Link: https://pip-assets.raspberrypi.com/categories/1216-raspberry-pi-radio-module-2/documents/RP-008943-DS-4-Radio%20Module%202%20Datasheet.pdf?disposition=inline; Height: 2.55mm; Category: Modules
footprint RMC20452T
pins: 1 GROUND_1, 2 NO_CONNECT_1, 3 GSPI_SCLK, 4 GROUND_2, 5 GSPI_DATA_IN, 6 GSPI_DATA_OUT, 7 GROUND_3, 8 GPIO0, 9 GSPI_CS, 10 NIRQ, 11 GROUND_4, 12 WI-FI_ON, 13 BLUETOOTH_ON, 14 VDDIO_(IO_VOLTAGE_EITHER_3.3_V_OR_1.8_V), 15 GROUND_5, 16 VIN_(3.0_V_TO_4.8_V), 17 GPIO2, 18 GPIO1, 19 NO_CONNECT_2, 20 NO_CONNECT_3, 21 GROUND_6

## RP2354B
designator U?
Integrated Circuit; Manufacturer_Name: RASPBERRY-PI; Manufacturer_Part_Number: RP2354B; Datasheet Link: https://datasheets.raspberrypi.com/rp2350/rp2350-product-brief.pdf; Height: 0.9mm; Category: Processors_Memory
footprint QFN40P1000X1000X90-81N-D
pins: 1 GPIO4, 2 GPIO5, 3 GPIO6, 4 GPIO7, 5 IOVDD_1, 6 GPIO8, 7 GPIO9, 8 GPIO10, 9 GPIO11, 10 DVDD_1, 11 GPIO12, 12 GPIO13, 13 GPIO14, 14 GPIO15, 15 IOVDD_2, 16 GPIO16, 17 GPIO17, 18 GPIO18, 19 GPIO19, 20 GPIO20, 21 GPIO21, 22 GPIO22, 23 GPIO23, 24 IOVDD_3, 25 GPIO24, 26 GPIO25, 27 GPIO26, 28 GPIO27, 29 IOVDD_4, 30 XIN, 31 XOUT, 32 DVDD_2, 33 SWCLK, 34 SWDIO, 35 RUN, 36 GPIO28, 37 GPIO29, 38 GPIO30, 39 GPIO31, 40 GPIO32, 41 IOVDD_5, 42 GPIO33, 43 GPIO34, 44 GPIO35, 45 GPIO36, 46 GPIO37, 47 GPIO38, 48 GPIO39, 49 GPIO40_ADC0, 50 IOVDD_6, 51 DVDD_3, 52 GPIO41_ADC1, 53 GPIO42_ADC2, 54 GPIO43_ADC3, 55 GPIO44_ADC4, 56 GPIO45_ADC5, 57 GPIO46_ADC6, 58 GPIO47_ADC7, 59 ADC_AVDD, 60 IOVDD_7, 61 VREG_AVDD, 62 VREG_PGND, 63 VREG_LX, 64 VREG_VIN, 65 VREG_FB, 66 USB_DM, 67 USB_DP, 68 USB_OTP_VDD, 69 QSPI_IOVDD, 70 QSPI_SD3, 71 QSPI_SCLK, 72 QSPI_SD0, 73 QSPI_SD2, 74 QSPI_SD1, 75 QSPI_SS, 76 IOVDD_8, 77 GPIO0, 78 GPIO1, 79 GPIO2, 80 GPIO3, 81 GND

## SMBJ36CA
designator D?  PKG_STYLE: DO-214AA (SMB)  (hidden comment: SMBJ36CA)
Littelfuse 600 W bidirectional TVS diode VR 36 V DO-214AA (SMB); PLACE: YES; VALUE: SMBJ36CA; Category: Discretes
footprint DO-214AA_SMB
pins: 1, 2

## TIC12400DCPR
designator U?  PKG_STYLE: PKG_STL  (hidden comment: TIC12400DCPR)
TI TIC12400 24-input MSDI with ADC and adjustable wetting current, SPI, HTSSOP-38 DCP0038A, EP = 39 (connect to GND); Manufacturer: Texas Instruments; PLACE: YES; Manufacturer Part Number: TIC12400DCPR; VALUE: VALUE; Category: Interface
footprint TI_DCP0038A
pins: 1 IN13 (in), 2 IN14 (in), 3 IN15 (in), 4 IN16 (in), 5 IN17 (in), 6 IN18 (in), 7 IN19 (in), 8 IN20 (in), 9 AGND (power), 10 IN21 (in), 11 IN22 (in), 12 IN23 (in), 13 IN0 (in), 14 IN1 (in), 15 ~{CS} (in), 16 SCLK (in), 17 SI (in), 18 SO (out), 19 VDD (power), 20 CAP_A, 21 RESET (in), 22 CAP_PRE, 23 CAP_D, 24 ~{INT} (oc), 25 IN2 (in), 26 IN3 (in), 27 IN4 (in), 28 DGND (power), 29 IN5 (in), 30 IN6 (in), 31 IN7 (in), 32 IN8 (in), 33 IN9 (in), 34 IN10 (in), 35 IN11 (in), 36 IN12 (in), 37 VS (power), 38 VS (power), 39 EP (power)

## TLF35584QKVS2XUMA2
designator U?
Integrated Circuit; Manufacturer_Name: Infineon; Manufacturer_Part_Number: TLF35584QKVS2XUMA2; Datasheet Link: https://www.farnell.com/datasheets/2820312.pdf; Height: 1.6mm; Mouser Part Number: 726-TLF35584QKVS2XUM; Mouser Price/Stock: https://www.mouser.co.uk/ProductDetail/Infineon-Technologies/TLF35584QKVS2XUMA2?qs=HXFqYaX1Q2wzGzPMFYKHIw%3D%3D; Arrow Part Number: TLF35584QKVS2XUMA2; Arrow Price/Stock: https://www.arrow.com/en/products/tlf35584qkvs2xuma2/infineon-technologies-ag?utm_currency=USD&region=nac; Category: Power
footprint QFP50P1200X1200X160-65N
pins: 1 RSL, 2 BSG, 3 N.C._1, 4 N.C._2, 5 VST, 6 N.C._3, 7 ENA, 8 WAK, 9 N.C._4, 10 QST, 11 AG1, 12 AGS1, 13 AGS2, 14 N.C._5, 15 SS2, 16 SS1, 17 SDI, 18 SDO, 19 SCL, 20 SCS, 21 WDI, 22 ROT, 23 INT, 24 SYN, 25 ERR, 26 EVC, 27 MPS, 28 SEC, 29 FRE, 30 STU, 31 VCI, 32 GST, 33 N.C._6, 34 N.C._7, 35 AG2, 36 AG3, 37 N.C._8, 38 QVR, 39 QUC, 40 SQUC, 41 QCO, 42 QT2, 43 SQT2, 44 SQT1, 45 QT1, 46 FB1, 47 FB2, 48 FB3, 49 FB4, 50 AG4, 51 PG2, 52 PG1, 53 N.C._9, 54 N.C._10, 55 SW2, 56 SW1, 57 N.C._11, 58 N.C._12, 59 VS2, 60 VS1, 61 N.C._13, 62 N.C._14, 63 DRG, 64 RSH, 65 GND

## TPS3700QDDCRQ1
designator U?
Integrated Circuit; Manufacturer_Name: Texas Instruments; Manufacturer_Part_Number: TPS3700QDDCRQ1; Datasheet Link: http://www.ti.com/lit/gpn/tps3700-q1; Height: 1.1mm; Mouser Part Number: 595-TPS3700QDDCRQ1; Mouser Price/Stock: https://www.mouser.co.uk/ProductDetail/Texas-Instruments/TPS3700QDDCRQ1?qs=p08Uhw9w2FwXQ4bkhTfdGg%3D%3D; Arrow Part Number: TPS3700QDDCRQ1; Arrow Price/Stock: https://www.arrow.com/en/products/tps3700qddcrq1/texas-instruments.html?utm_currency=USD&region=nac; Category: Power
footprint SOT95P280X110-6N
pins: 1 OUTA, 2 GND, 3 INA+, 4 INB-, 5 VDD, 6 OUTB

## TPS61088RHLR
designator U?
TI TPS61088 10 A synchronous boost, 2.7-12 V in, VQFN-20 RHL; Manufacturer: Texas Instruments; Manufacturer Part Number: TPS61088RHLR; Category: Power
footprint TI_RHL0020A
part A pins: 1 VCC, 2 EN, 3 FSW, 4 SW, 5 SW, 6 SW, 7 SW, 8 BOOT, 9 VIN, 10 SS, 11 NC, 12 NC, 13 MODE, 14 VOUT, 15 VOUT, 16 VOUT, 17 FB, 18 COMP, 19 ILIM, 20 AGND, 21 PGND

## TPS65381AQDAPRQ1
designator U?
Integrated Circuit; Manufacturer_Name: Texas Instruments; Manufacturer_Part_Number: TPS65381AQDAPRQ1; Datasheet Link: http://www.ti.com/lit/gpn/tps65381a-q1; Height: 1.2mm; Mouser Part Number: 595-TPS65381AQDAPRQ1; Mouser Price/Stock: https://www.mouser.co.uk/ProductDetail/Texas-Instruments/TPS65381AQDAPRQ1?qs=Bho%2FbeBaDExXUGAFZ2tmYA%3D%3D; Arrow Part Number: TPS65381AQDAPRQ1; Arrow Price/Stock: https://www.arrow.com/en/products/tps65381aqdaprq1/texas-instruments?region=nac; Category: Power
footprint SOP65P810X120-33N
pins: 1 VBAT_SAFING, 2 VCP, 3 CP1, 4 CP2, 5 PGND_1, 6 NRES, 7 DIAG_OUT, 8 NCS, 9 SDI, 10 SDO, 11 SCLK, 12 RSTEXT, 13 ERROR/WDI, 14 CANWU, 15 VSFB1, 16 VSIN, 17 VSOUT1, 18 VTRACK1, 19 GND_1, 20 VDD5, 21 VDD3/5, 22 VDDIO, 23 GND_2, 24 VDD1_SENSE, 25 PGND_2, 26 VDD1_G, 27 VDD6, 28 SDN6, 29 VBATP, 30 IGN, 31 SEL_VDD3/5, 32 ENDRV, 33 EP

## TPS259531DSGR
designator U?
TI TPS259531 eFuse 2.7-18 V 4 A, 5.7 V OV clamp, auto-retry, WSON-8; Manufacturer: Texas Instruments; Manufacturer Part Number: TPS259531DSGR; Category: Power
footprint TI_DSG0008A
pins: 1 dVdt, 2 EN/UVLO (in), 3 IN (power), 4 IN (power), 5 OUT (power), 6 ~{FLT} (oc), 7 ILM, 8 GND (power), 9 PAD (power)

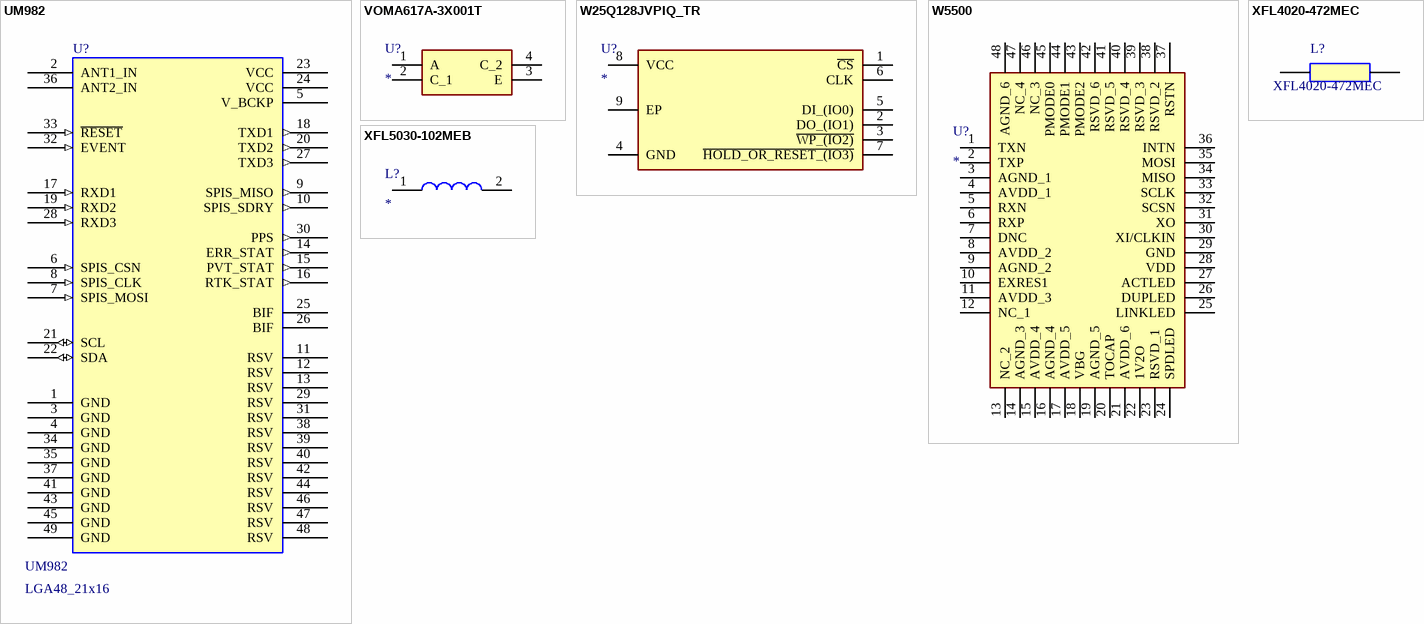
[diagram p3: symbols UM982 to XFL5030-102MEB]

## UM982
designator U?  value UM982  PKG_STYLE: LGA48_21x16  (hidden comment: *)
Unicore UM982 multi-constellation dual-antenna GNSS RTK/heading module 3.3V LGA-48; PLACE: YES; Category: Modules
footprint UNICORE_UM982_LGA48_21x16 (Unicore UM982 GNSS module, LGA-48 + 35 GND pads, 21.0x16.0x2.6mm, per UM982 manual R1.8 Fig 3-4)
pins: 1 GND (power), 2 ANT1_IN, 3 GND (power), 4 GND (power), 5 V_BCKP (power), 6 SPIS_CSN (in), 7 SPIS_MOSI (in), 8 SPIS_CLK (in), 9 SPIS_MISO (out), 10 SPIS_SDRY (out), 11 RSV, 12 RSV, 13 RSV, 14 ERR_STAT (out), 15 PVT_STAT (out), 16 RTK_STAT (out), 17 RXD1 (in), 18 TXD1 (out), 19 RXD2 (in), 20 TXD2 (out), 21 SCL (io), 22 SDA (io), 23 VCC (power), 24 VCC (power), 25 BIF, 26 BIF, 27 TXD3 (out), 28 RXD3 (in), 29 RSV, 30 PPS (out), 31 RSV, 32 EVENT (in), 33 ~{RESET} (in), 34 GND (power), 35 GND (power), 36 ANT2_IN, 37 GND (power), 38 RSV, 39 RSV, 40 RSV, 41 GND (power), 42 RSV, 43 GND (power), 44 RSV, 45 GND (power), 46 RSV, 47 RSV, 48 RSV, 49 GND (power)

## VOMA617A-3X001T
designator U?
Undefined or Miscellaneous; Manufacturer_Name: Vishay; Manufacturer_Part_Number: VOMA617A-3X001T; Datasheet Link: http://www.vishay.com/docs/84433/voma617a.pdf; Height: 2.42mm; Mouser Part Number: 78-VOMA617A-3X001T; Mouser Price/Stock: https://www.mouser.co.uk/ProductDetail/Vishay-Semiconductors/VOMA617A-3X001T?qs=F5EMLAvA7IBCSKWS3y54oA%3D%3D; Arrow Part Number: VOMA617A-3X001T; Arrow Price/Stock: https://www.arrow.com/en/products/voma617a-3x001t/vishay?region=nac; Category: Interface
footprint SOP254P695X242-4N
pins: 1 A, 2 C_1, 3 E, 4 C_2

## W25Q128JVPIQ_TR
designator U?
Integrated Circuit; Manufacturer_Name: Winbond; Manufacturer_Part_Number: W25Q128JVPIQ TR; Datasheet Link: https://www.winbond.com/resource-files/w25q128jv%20revf%2003272018%20plus.pdf; Height: 0.8mm; Mouser Part Number: 454-W25Q128JVPIQTR; Mouser Price/Stock: https://www.mouser.co.uk/ProductDetail/Winbond/W25Q128JVPIQ-TR?qs=qSfuJ%252Bfl%2Fd6H7vbXyrDu3w%3D%3D; Arrow Part Number: W25Q128JVPIQ TR; Arrow Price/Stock: https://www.arrow.com/en/products/w25q128jvpiqtr/winbond-electronics?utm_currency=USD&region=nac; Category: Processors_Memory
footprint SON127P600X500X80-9N-D
pins: 1 ~{CS}, 2 DO_(IO1), 3 ~{WP_(IO2)}, 4 GND, 5 DI_(IO0), 6 CLK, 7 ~{HOLD_OR_RESET_(IO3)}, 8 VCC, 9 EP

## W5500
designator U?
Integrated Circuit; Manufacturer_Name: Wiznet Technology; Manufacturer_Part_Number: W5500; Datasheet Link: https://docs.wiznet.io/img/products/w5500/W5500_ds_v110e.pdf; Height: 1.6mm; Arrow Part Number: W5500; Arrow Price/Stock: https://www.arrow.com/en/products/w5500/wiznet?utm_currency=USD&region=nac; Category: Interface
footprint QFP50P900X900X160-48N
pins: 1 TXN, 2 TXP, 3 AGND_1, 4 AVDD_1, 5 RXN, 6 RXP, 7 DNC, 8 AVDD_2, 9 AGND_2, 10 EXRES1, 11 AVDD_3, 12 NC_1, 13 NC_2, 14 AGND_3, 15 AVDD_4, 16 AGND_4, 17 AVDD_5, 18 VBG, 19 AGND_5, 20 TOCAP, 21 AVDD_6, 22 1V2O, 23 RSVD_1, 24 SPDLED, 25 LINKLED, 26 DUPLED, 27 ACTLED, 28 VDD, 29 GND, 30 XI/CLKIN, 31 XO, 32 SCSN, 33 SCLK, 34 MISO, 35 MOSI, 36 INTN, 37 RSTN, 38 RSVD_2, 39 RSVD_3, 40 RSVD_4, 41 RSVD_5, 42 RSVD_6, 43 PMODE2, 44 PMODE1, 45 PMODE0, 46 NC_3, 47 NC_4, 48 AGND_6

## XFL4020-472MEC
designator L?
Coilcraft XFL4020 4.7 uH 20% shielded power inductor; Manufacturer: Coilcraft; Manufacturer Part Number: XFL4020-472MEC; Category: Passives
footprint COILCRAFT_XFL4020
pins: 1, 2

## XFL5030-102MEB
designator L?
Inductor; Manufacturer_Name: COILCRAFT; Manufacturer_Part_Number: XFL5030-102MEB; Datasheet Link: https://www.coilcraft.com/pdfs/xfl5030.pdf; Height: 3mm; Mouser Part Number: 994-XFL5030-102MEB; Mouser Price/Stock: https://www.mouser.co.uk/ProductDetail/Coilcraft/XFL5030-102MEB?qs=chTDxNqvsykYOs%252BKBYI9rg%3D%3D; Category: Passives
footprint XFL5030222MEB
pins: 1, 2